# Altium footprint library tp-keystone-5015.PcbLib: 1 footprints
Each footprint in its own frame and in the unit in brackets; x right, y up, seen from the top. Pads: shape width x height; smd on the part's side, far side on the other; paste and mask are expansions set on the pad; w line width, h text height; cw(c..) or ccw(c..) is an arc to the next point about the centre after c.
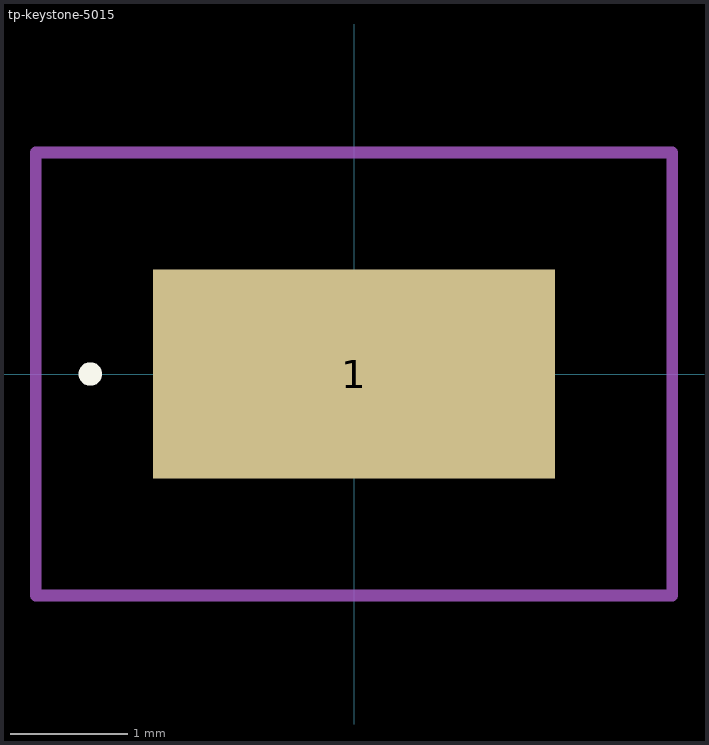
[diagram p0: the footprint, top view; thin cyan lines are the x and y axes]

## tp-keystone-5015 [mm]
pads (1):
  rect 3.43x1.78 smd: 1(0,0)
Top Overlay:
  lines w0.1: -2.3,0 ccw(c-2.25,0) -2.2,0 ccw(c-2.25,0) -2.3,0
Mechanical 13:
  lines w0.1: -1.335,-0.51 -1.335,0.51 1.335,0.51 1.335,-0.51 -1.335,-0.51
Mechanical 15:
  lines w0.1: -2.715,-1.89 -2.715,1.89 2.715,1.89 2.715,-1.89 -2.715,-1.89
3D body "9-5015-TL.stp": height 1.52, standoff 0, extent -1.334,-0.51 1.334,0.51